# Altium footprint library TitansLib.PcbLib: 333 footprints (part 5 of 21)
Each footprint in its own frame and in the unit in brackets; x right, y up, seen from the top. Pads: shape width x height; smd on the part's side, far side on the other; paste and mask are expansions set on the pad; w line width, h text height; cw(c..) or ccw(c..) is an arc to the next point about the centre after c.
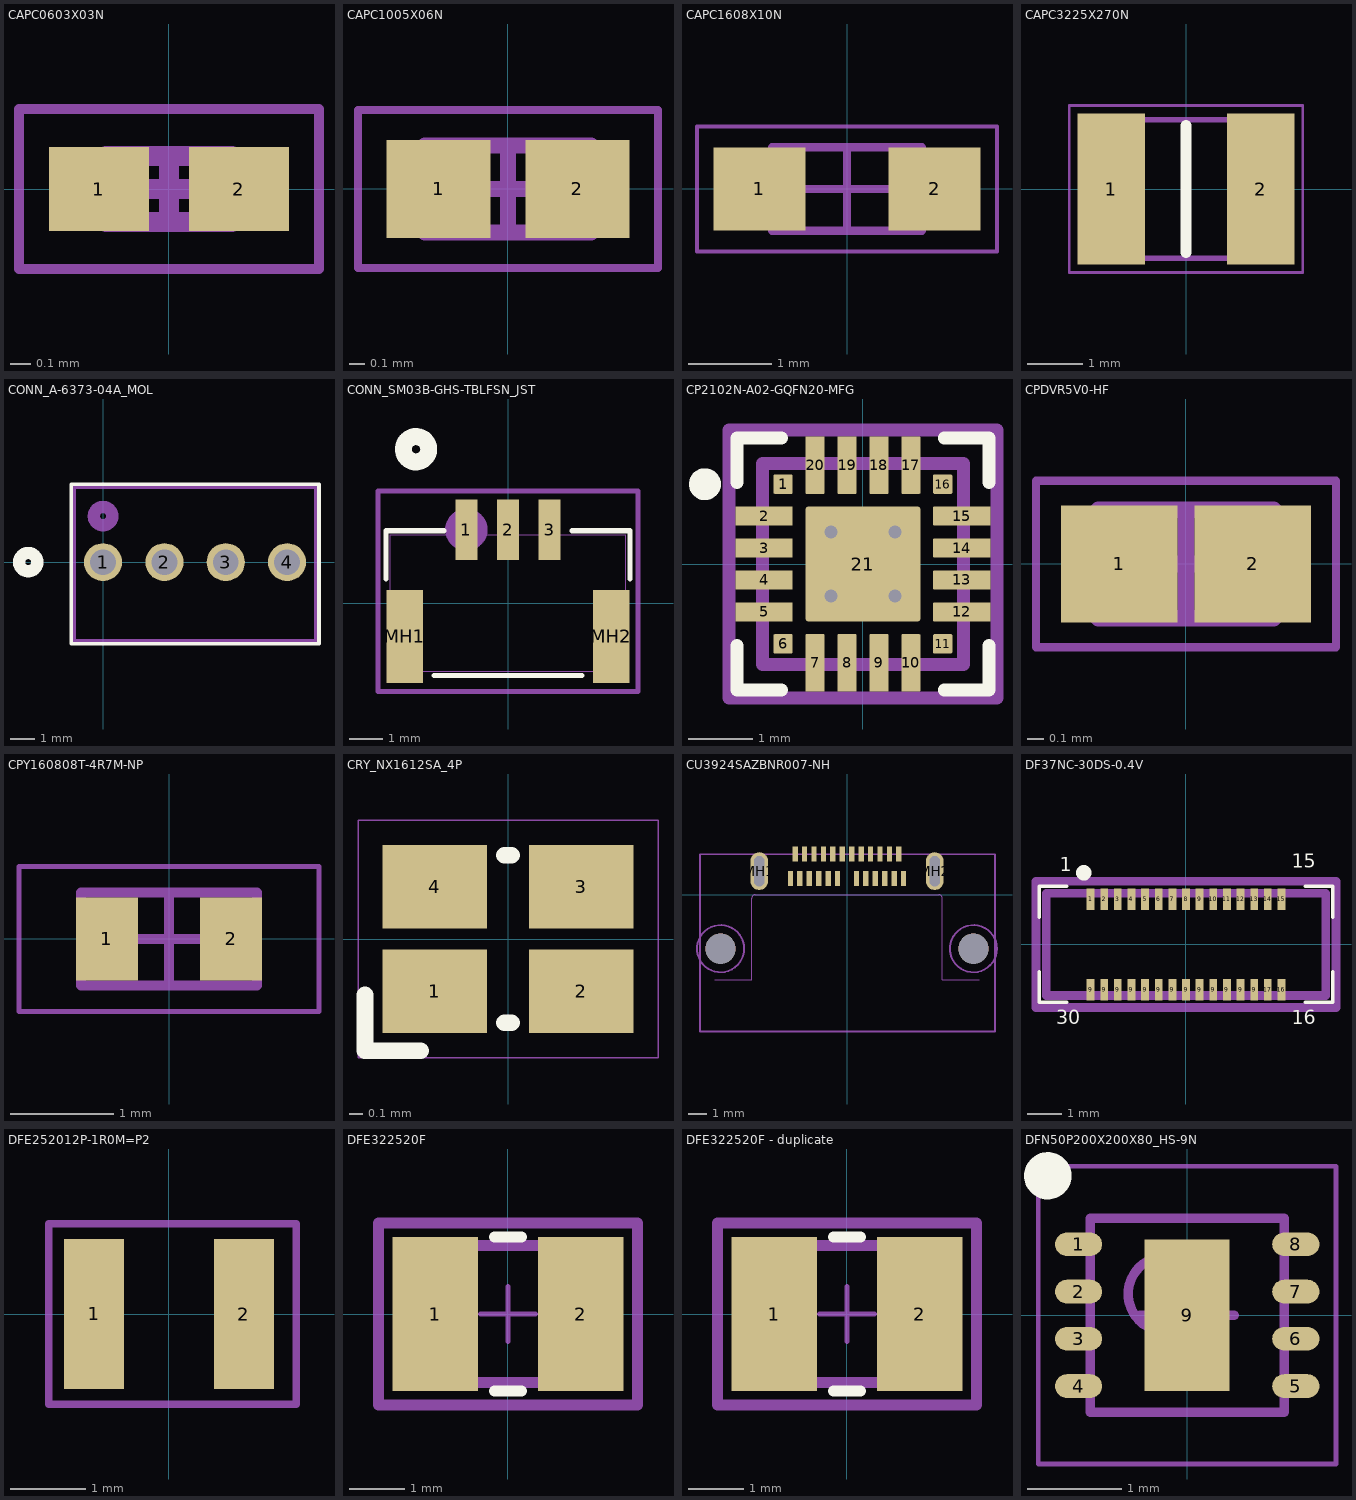
[diagram p4: the footprints below, top view; thin cyan lines are the x and y axes]

## CAPC0603X03N [mm] "Chip Capacitor, 2-Leads, Body 0.60x0.30mm, IPC Medium Density"
height 0.33
pads (2):
  rect 0.5x0.42 smd: 1(-0.35,0) 2(0.35,0)
Top Courtyard:
  lines w0.05: -0.75,-0.4 -0.75,0.4 0.75,0.4 0.75,-0.4 -0.75,-0.4
  lines w0.1: -0.165,0 0.165,0 ; 0,-0.165 0,0.165
Top Assembly:
  lines w0.1: -0.315,-0.165 -0.315,0.165 0.315,0.165 0.315,-0.165 -0.315,-0.165
3D body "CAPC0603X03N.step": height 0.33, standoff 0, extent -0.315,-0.165 0.315,0.165

## CAPC1005X06N [mm] "Chip Capacitor, 2-Leads, Body 1.00x0.50mm, IPC Medium Density"
height 0.55
pads (2):
  rect 0.66x0.62 smd mask+0.051: 1(-0.44,0) 2(0.44,0)
Top Courtyard:
  lines w0.05: -0.95,-0.5 -0.95,0.5 0.95,0.5 0.95,-0.5 -0.95,-0.5
  lines w0.1: -0.275,0 0.275,0 ; 0,-0.275 0,0.275
Top Assembly:
  lines w0.1: -0.525,-0.275 -0.525,0.275 0.525,0.275 0.525,-0.275 -0.525,-0.275
3D body "CAPC1005X06N.step": height 0.55, standoff 0, extent -0.525,-0.275 0.525,0.275

## CAPC1608X10N [mm] "Chip Capacitor, 2-Leads, Body 1.60x0.80mm, IPC Medium Density"
height 1
pads (2):
  rect 1.1x1 smd mask+0.05: 1(-1.05,0) 2(1.05,0)
Top Courtyard:
  lines w0.05: -1.8,-0.75 1.8,-0.75 1.8,0.75 -1.8,0.75 -1.8,-0.75
  lines w0.1: -0.5,0 0.5,0 ; 0,-0.5 0,0.5
Top Assembly:
  lines w0.1: -0.9,-0.5 0.9,-0.5 0.9,0.5 -0.9,0.5 -0.9,-0.5
3D body "CAPC1608X10N.step": height 1, standoff 0, extent -0.9,-0.5 0.9,0.5

## CAPC3225X270N [mm]
pads (2):
  rect 1.22x2.72 smd: 1(-1.35,0) 2(1.35,0)
Top Overlay:
  lines w0.2: 0,-1.15 0,1.15
Mechanical 13:
  lines w0.1: -1.6,-1.25 1.6,-1.25 1.6,1.25 -1.6,1.25 -1.6,-1.25
Mechanical 15:
  lines w0.05: -2.11,-1.51 2.11,-1.51 2.11,1.51 -2.11,1.51 -2.11,-1.51
3D body "CL32A476MOJNNNE.stp": height 2.7, standoff 0, extent -1.6,-1.25 1.6,1.25

## CONN_A-6373-04A_MOL [mil]
pads (4):
  round 62 hole 42: 1(0,0) 2(100,0) 3(200,0) 4(300,0)
Top Overlay:
  lines w6: -52,-133 -52,127 352,127 352,-133 -52,-133
  lines w20: -137,0 cw(c-122,0) -107,0 cw(c-122,0) -137,0
Bottom Overlay:
  lines w20: -137,0 cw(c-122,0) -107,0 cw(c-122,0) -137,0
Mechanical 13:
  lines w6: -47,-128 -47,122 347,122 347,-128 -47,-128
  lines w20: -15,75 cw(c0,75) 15,75 cw(c0,75) -15,75
3D body "22232041.STEP": height 420.08, standoff -140.16, extent -47.05,-130 347.05,120

## CONN_SM03B-GHS-TBLFSN_JST [mil]
pads (5):
  rect 26x71 smd paste+0 mask+0: 1(-49.21,86.76) 2(0,86.76) 3(49.21,86.76)
  rect 43x110 smd paste+0 mask+0: MH1(-122.05,-39.22) MH2(122.05,-39.22)
Top Overlay:
  circle w20: c-108.55,181.76 r15
  lines w6: -144,28.87 -144,85.5 -75.31,85.5 ; -87.45,-85.5 87.45,-85.5 ; 75.31,85.5 144,85.5 144,28.87
Bottom Overlay:
  circle w20: c-108.55,181.76 r15
Mechanical 13:
  circle w20: c-49.21,86.76 r15
  lines w1: -139,-80.5 139,-80.5 139,80.5 -139,80.5 -139,-80.5
Mechanical 15:
  lines w6: -153.55,-104.22 -153.55,132.26 153.55,132.26 153.55,-104.22 -153.55,-104.22

## CP2102N-A02-GQFN20-MFG [mm]
pads (21):
  rrect10% 0.3x0.3 smd paste+0 mask+0: 1(-1.25,1.25) 6(-1.25,-1.25) 11(1.25,-1.25) 16(1.25,1.25)
  rrect10% 0.9x0.3 smd paste+0 mask+0: 2(-1.55,0.75) 3(-1.55,0.25) 4(-1.55,-0.25) 5(-1.55,-0.75) 12(1.55,-0.75) 13(1.55,-0.25) 14(1.55,0.25) 15(1.55,0.75)
  rrect10% 0.3x0.9 smd paste+0 mask+0: 7(-0.75,-1.55) 8(-0.25,-1.55) 9(0.25,-1.55) 10(0.75,-1.55) 17(0.75,1.55) 18(0.25,1.55) 19(-0.25,1.55) 20(-0.75,1.55)
  rrect5% 1.8x1.8 smd paste-1000 mask+0: 21(0,0)
via -0.5,-0.5 diameter 0.4 hole 0.2
via 0.5,-0.5 diameter 0.4 hole 0.2
via 0.5,0.5 diameter 0.4 hole 0.2
via -0.5,0.5 diameter 0.4 hole 0.2
Top Overlay:
  circle w0.25: c-2.475,1.25 r0.125
  lines w0.2: -1.975,-1.275 -1.975,-1.975 -1.275,-1.975 ; -1.975,1.275 -1.975,1.975 -1.275,1.975 ; 1.275,-1.975 1.975,-1.975 1.975,-1.275 ; 1.275,1.975 1.975,1.975 1.975,1.275
Top Paste:
  rectangle: 0.1,-0.85 0.85,-0.1
  rectangle: -0.85,-0.85 -0.1,-0.1
  rectangle: 0.1,0.1 0.85,0.85
  rectangle: -0.85,0.1 -0.1,0.85
Top 3D Body:
  lines w0.2: -1.575,-1.575 -1.575,1.575 1.575,1.575 1.575,-1.575 -1.575,-1.575
Top Courtyard:
  lines w0.2: -2.1,-2.1 -2.1,2.1 2.1,2.1 2.1,-2.1 -2.1,-2.1
Top Component Center:
  lines w0.1: -0.5,0 0.5,0 ; 0,-0.5 0,0.5
Top Assembly:
  lines w0.2: -2.1,-2.1 -2.1,2.1 2.1,2.1 2.1,-2.1 -2.1,-2.1
  text ".Designator" at 0,0.188 h1
3D body "IC_Silicon_Labs_CP2102N-A02-GQFN20_eec.STEP": height 0.25, standoff 0, extent -2.1,-2.1 2.1,2.1

## CPDVR5V0-HF [mm] "Chip Diode, 2-Leads, Body 1,00x0,60mm, IPC Medium Density"
height 0.55
pads (2):
  rect 0.7x0.7 smd: 1(-0.4,0) 2(0.4,0)
Top Courtyard:
  lines w0.05: -0.9,-0.5 0.9,-0.5 0.9,0.5 -0.9,0.5 -0.9,-0.5
  lines w0.1: -0.325,0 0.325,0 ; 0,-0.325 0,0.325
Top Assembly:
  lines w0.1: -0.525,-0.325 0.525,-0.325 0.525,0.325 -0.525,0.325 -0.525,-0.325
3D body "CPDVR5V0-HF.step": height 0.55, standoff 0, extent -0.525,-0.325 0.525,0.325

## CPY160808T-4R7M-NP [mm] "CPY160808T-4R7M-NP"
height 0.45
pads (2):
  rect 0.6x0.8 smd mask+0.051: 1(-0.6,0) 2(0.6,0)
Top Courtyard:
  lines w0.05: -1.45,-0.7 1.45,-0.7 1.45,0.7 -1.45,0.7 -1.45,-0.7
  lines w0.1: -0.45,0 0.45,0 ; 0,-0.45 0,0.45
Mechanical 13:
  lines w0.1: -0.85,-0.45 0.85,-0.45 0.85,0.45 -0.85,0.45 -0.85,-0.45
3D body "RES0603-M.step": height 0.45, standoff 0, extent -0.85,-0.45 0.85,0.45

## CRY_NX1612SA_4P [mm] "MCD-02262"
height 0.3
pads (4):
  rect 0.75x0.6 smd mask+0.038: 1(-0.525,-0.375) 2(0.525,-0.375) 3(0.525,0.375) 4(-0.525,0.375)
Top Overlay:
  lines w0.12: -1.025,-0.4 -1.025,-0.8 -0.625,-0.8 ; -0.025,-0.6 0.025,-0.6 ; -0.025,0.6 0.025,0.6
Top Courtyard:
  lines w0.01: -1.075,-0.85 1.075,-0.85 1.075,0.85 -1.075,0.85 -1.075,-0.85
3D body: height 0.51, standoff 0.5, extent -0.787,-0.587 -0.462,-0.262
3D body: height 0.5, standoff 0, extent -0.8,-0.6 0.8,0.6
3D body "User Library-NX1612SA.STEP": height 0.3, standoff 0, extent -0.8,-0.6 0.8,0.6

## CU3924SAZBNR007-NH [mm]
pads (28):
  rect 0.28x0.8 smd mask+0.05: A1(-2.75,2.15) A2(-2.25,2.15) A3(-1.75,2.15) A4(-1.25,2.15) A5(-0.75,2.15) A6(-0.25,2.15) A7(0.25,2.15) A8(0.75,2.15) A9(1.25,2.15) A10(1.75,2.15) A11(2.25,2.15) A12(2.75,2.15) B1(3,0.85) B2(2.5,0.85) B3(2,0.85) B4(1.5,0.85) B5(1,0.85) B6(0.5,0.85) B7(-0.5,0.85) B8(-1,0.85) B9(-1.5,0.85) B10(-2,0.85) B11(-2.5,0.85) B12(-3,0.85)
  oval 0.95x2 hole 0.55 slot 1.6 at 90 deg mask+0.102: MH1(-4.65,1.25) MH2(4.65,1.25)
  round 1.6 hole 1.6 unplated mask+0.102: ""(-6.7,-2.86) ""(6.7,-2.86)
Top Courtyard:
  circle w0.1: c-6.7,-2.86 r1.25
  circle w0.1: c6.7,-2.86 r1.25
Top Assembly:
  lines w0.1: -7.796,-7.246 7.846,-7.246 7.846,2.146 -7.796,2.146 -7.796,-7.246
  text ".Designator" at -2.125,-2.637 h1
Mechanical 13:
  lines w0.05: -7,-4.5 -5.05,-4.5 -5.05,-0.2 cw(c-4.85,-0.2) -4.85,0 4.85,0 cw(c4.85,-0.2) 5.05,-0.2 5.05,-4.5 7,-4.5
3D body "CU3924SAZBNR007-NH.stp": height 2, standoff -2.64, extent -7.917,-7.378 7.967,2.279

## DF37NC-30DS-0.4V [mm]
pads (30):
  rect 0.23x0.63 smd mask+0.045: 1(-2.8,1.325) 2(-2.4,1.325) 3(-2,1.325) 4(-1.6,1.325) 5(-1.2,1.325) 6(-0.8,1.325) 7(-0.4,1.325) 8(0,1.325) 9(-2.8,-1.325) 9(-2.4,-1.325) 9(-2,-1.325) 9(-1.6,-1.325) 9(-1.2,-1.325) 9(-0.8,-1.325) 9(-0.4,-1.325) 9(0,-1.325) 9(0.4,-1.325) 9(0.4,1.325) 9(0.8,-1.325) 9(1.2,-1.325) 9(1.6,-1.325) 9(2,-1.325) 10(0.8,1.325) 11(1.2,1.325) 12(1.6,1.325) 13(2,1.325) 14(2.4,1.325) 15(2.8,1.325) 16(2.8,-1.325) 17(2.4,-1.325)
Top Overlay:
  circle w0.254: c-3,2.1 r0.1
  lines w0.1: -4.3,-0.8 -4.3,-1.7 -3.5,-1.7 ; -4.3,0.8 -4.3,1.7 -3.5,1.7 ; 3.5,-1.7 4.3,-1.7 4.3,-0.8 ; 3.5,1.7 4.3,1.7 4.3,0.8
  text "1" at -3.7,2 h0.7
  text "15" at 3.1,2.107 h0.7
  text "30" at -3.8,-2.492 h0.7
  text "16" at 3.1,-2.493 h0.7
Top Courtyard:
  lines w0.254: -4.4,-1.85 4.4,-1.85 4.4,1.85 -4.4,1.85 -4.4,-1.85
Top Assembly:
  lines w0.254: -4.1,-1.5 4.1,-1.5 4.1,1.5 -4.1,1.5 -4.1,-1.5
  text ".Designator" at -1.95,-0.187 h1
3D body "DF37NC-30DS-0.4V.stp": height 0.96, standoff -0.02, extent -4.113,-1.499 4.107,1.481

## DFE252012P-1R0M=P2 [mm]
pads (2):
  rect 0.8x2 smd: 1(-1,0) 2(1,0)
Top Courtyard:
  lines w0.1: -1.6,-1.2 -1.6,1.2 1.7,1.2 1.7,-1.2 -1.6,-1.2
3D body "DFE252012P-1R0M_P2.step": height 1.19, standoff -0.01, extent -1.22,-1.013 1.28,0.987

## DFE322520F [mm]
pads (2):
  rect 1.553x2.804 smd paste+0 mask+0.075: 1(-1.325,0) 2(1.325,0)
Top Overlay:
  lines w0.2: -0.249,-1.402 0.249,-1.402 ; -0.249,1.402 0.249,1.402
Top 3D Body:
  lines w0.2: -1.6,-1.25 1.6,-1.25 1.6,1.25 -1.6,1.25 -1.6,-1.25
Top Courtyard:
  lines w0.2: -2.352,-1.652 2.352,-1.652 2.352,1.652 -2.352,1.652 -2.352,-1.652
Top Component Center:
  lines w0.1: -0.5,0 0.5,0 ; 0,-0.5 0,0.5
Top Assembly:
  lines w0.2: -2.352,-1.652 2.352,-1.652 2.352,1.652 -2.352,1.652 -2.352,-1.652
  text ".Designator" at 0,0.188 h1
3D body "Ind_Murata_DFE322520FD-4R7M=P2_eec.STEP": height 0.25, standoff 0, extent -2.352,-1.652 2.352,1.652

## DFE322520F - duplicate [mm]
pads (2):
  rect 1.553x2.804 smd paste+0 mask+0.075: 1(-1.325,0) 2(1.325,0)
Top Overlay:
  lines w0.2: -0.249,-1.402 0.249,-1.402 ; -0.249,1.402 0.249,1.402
Top 3D Body:
  lines w0.2: -1.6,-1.25 -1.6,1.25 1.6,1.25 1.6,-1.25 -1.6,-1.25
Top Courtyard:
  lines w0.2: -2.352,-1.652 -2.352,1.652 2.352,1.652 2.352,-1.652 -2.352,-1.652
Top Component Center:
  lines w0.1: -0.5,0 0.5,0 ; 0,-0.5 0,0.5
Top Assembly:
  lines w0.2: -2.352,-1.652 -2.352,1.652 2.352,1.652 2.352,-1.652 -2.352,-1.652
  text ".Designator" at 0,0.188 h1
3D body "Ind_Murata_DFE322520FD-4R7M=P2_eec.STEP": height 0.25, standoff 0, extent -2.352,-1.652 2.352,1.652

## DFN50P200X200X80_HS-9N [mm] "DFN, 8-Leads, Body 2.00x2.00mm, Pitch 0.50mm, Thermal Pad 0.90x1.60mm, IPC Medium Density"
height 0.8
pads (9):
  oval 0.5x0.25 smd mask+0.05: 1(-1.15,0.75) 2(-1.15,0.25) 3(-1.15,-0.25) 4(-1.15,-0.75) 5(1.15,-0.75) 6(1.15,-0.25) 7(1.15,0.25) 8(1.15,0.75)
  rect 0.9x1.6 smd mask+0.05: 9(0,0)
Top Overlay:
  circle w0.25: c-1.475,1.475 r0.125
Top Courtyard:
  lines w0.05: -1.575,-1.575 1.575,-1.575 1.575,1.575 -1.575,1.575 -1.575,-1.575
  lines w0.1: -0.5,0 0.5,0 ; 0,-0.5 0,0.5
Top Assembly:
  circle w0.1: c-0.225,0.225 r0.4
  lines w0.1: -1.025,-1.025 1.025,-1.025 1.025,1.025 -1.025,1.025 -1.025,-1.025
3D body "QFN50P200X200X80_HS-9N.step": height 0.8, standoff 0, extent -1.075,-1.025 1.075,1.025